# EAGLE library part IC_MCP4801 (library dp_devices.v6)
MCP4801 8-Bit Voltage output DAC, SPI
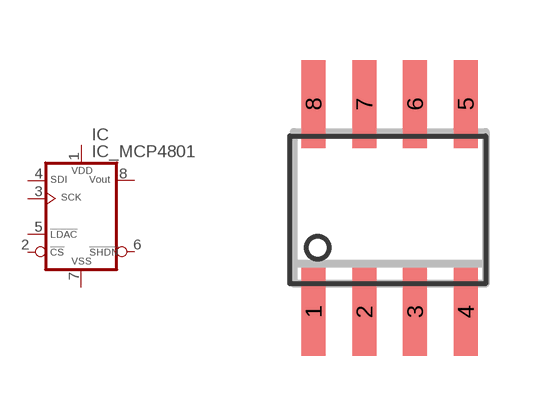
[diagram p181: symbol with the pads of SOIC-8; footprint SOIC-8]

Designator prefix IC

## IC_MCP4801  [SOIC-8]
1  VDD  pwr
2  !CS  in
3  SCK  in
4  SDI  in
5  !LDAC  in
6  !SHDN  in
7  VSS  pwr
8  VOUT  out

## Footprint SOIC-8 (pad centres in mm)
smd 0.6 x 2.2: 1 -1.905,-2.6; 2 -0.635,-2.6; 3 0.635,-2.6; 4 1.905,-2.6; 5 1.905,2.6; 6 0.635,2.6; 7 -0.635,2.6; 8 -1.905,2.6